# Altium integrated library Aluminium SMD 35V 6.3x7.7.IntLib: 1 symbol
Pins are listed as number, name and electrical type; pins without a type are passive.

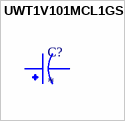
[diagram p0: symbol UWT1V101MCL1GS]

## UWT1V101MCL1GS
designator C?
Capacitor Aluminum Electrolytic, 1000h 6.3 (Dia.) x 7.7mm, 100uF, 35V, WT Series | Nichicon UWT1V101MCL1GS; SnapEDA_Link: https://www.snapeda.com/parts/UWT1V101MCL1GS/Nichicon/view-part/?ref=snap; Package: Radial Nichicon; Value: *; MF: Nichicon; MP: UWT1V101MCL1GS; Check_prices: https://www.snapeda.com/parts/UWT1V101MCL1GS/Nichicon/view-part/?ref=eda
footprint CAPAE830X1000N
pins: 1, 2